# Altium footprint library Footprints.PcbLib: 67 footprints (part 1 of 5)
Each footprint in its own frame and in the unit in brackets; x right, y up, seen from the top. Pads: shape width x height; smd on the part's side, far side on the other; paste and mask are expansions set on the pad; w line width, h text height; cw(c..) or ccw(c..) is an arc to the next point about the centre after c.
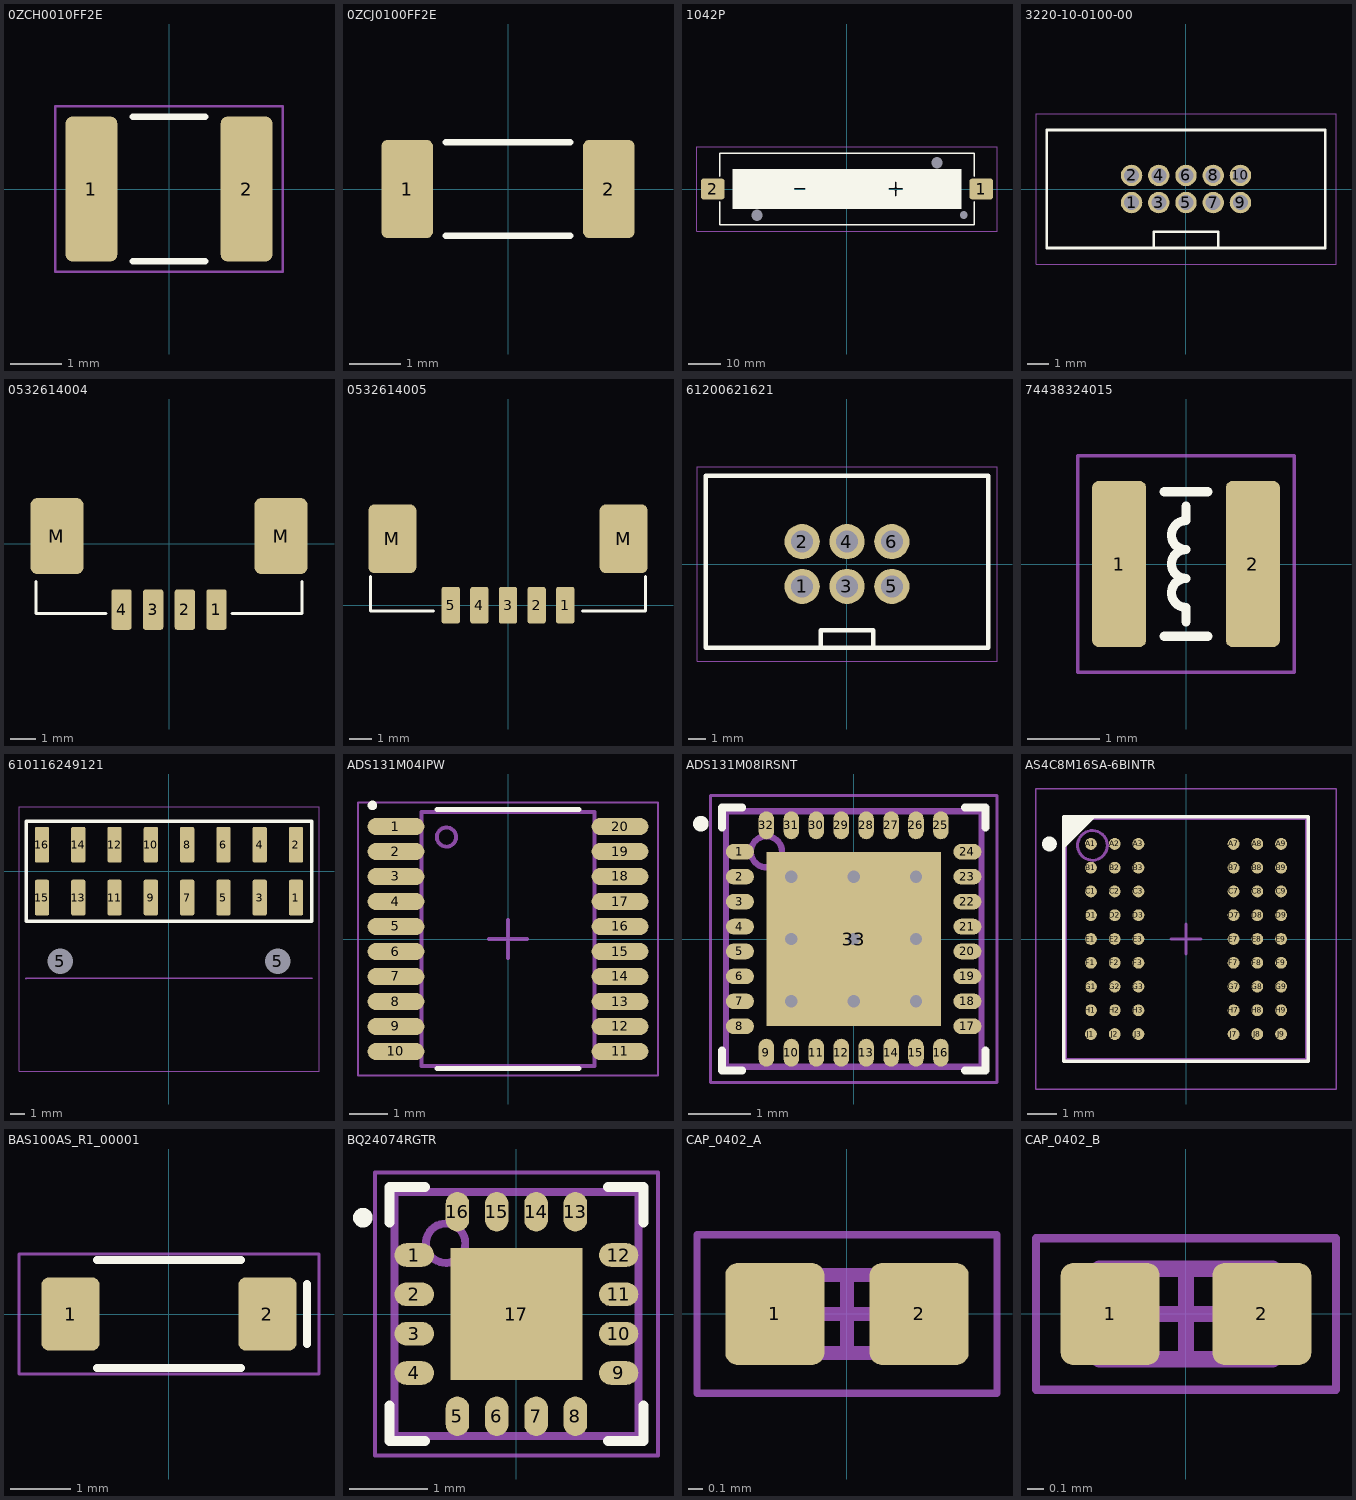
[diagram p0: the footprints below, top view; thin cyan lines are the x and y axes]

## 0ZCH0010FF2E [mm]
pads (2):
  rrect25% 1x2.8 smd: 1(-1.5,0) 2(1.5,0)
Top Overlay:
  lines w0.127: -0.7,-1.4 0.7,-1.4 ; -0.7,1.4 0.7,1.4
Top Courtyard:
  lines w0.05: -2.2,-1.6 2.2,-1.6 2.2,1.6 -2.2,1.6 -2.2,-1.6
Top Designator:
  text ".Designator" at -2.247,-0.225 h1
3D body "0ZCH0010FF2E.STEP": height 1.15, standoff 0, extent -1.607,-1.288 1.607,1.288

## 0ZCJ0100FF2E [mm]
pads (2):
  rrect25% 1x1.9 smd: 1(-1.95,0) 2(1.95,0)
Top Overlay:
  lines w0.127: -1.2,-0.9 1.2,-0.9 ; -1.2,0.9 1.2,0.9
Top Designator:
  text ".Designator" at -2.247,-0.225 h1
3D body "0ZCJ0100FF2E.step": height 0.82, standoff -0.03, extent -1.625,-0.825 1.625,0.825

## 1042P [mm] "Battery Holder (Open) 18650 1 Cell SMD (SMT) Tab"
height 18
pads (5):
  rrect25% 7.3x6.4 smd: 1(41.175,0) 2(-41.175,0)
  round 1.524 hole 3.5 unplated: 2(-27.6,-8) 2(27.6,8)
  round 1.524 hole 2.4 unplated: 2(35.82,-8)
Top Overlay:
  drawing of 47 lines, arcs and shapes, not listed
Top Courtyard:
  lines w0.05: -46,-13 46,-13 46,13 -46,13 -46,-13
Top Designator:
  text ".Designator" at -2.247,-0.225 h1
3D body "1042P.STEP": height 14.86, standoff -3.43, extent -43.002,-10.325 43.002,10.325

## 3220-10-0100-00 [mm] "Connector Header Through Hole 10 position 0.050\" (1.27mm)"
height 4.9
pads (10):
  round 1 hole 0.7: 1(-2.54,-0.635) 2(-2.54,0.635) 3(-1.27,-0.635) 4(-1.27,0.635) 5(0,-0.635) 6(0,0.635) 7(1.27,-0.635) 8(1.27,0.635) 9(2.54,-0.635) 10(2.54,0.635)
Top Overlay:
  lines w0.127: -6.5,-2.75 6.5,-2.75 6.5,2.75 -6.5,2.75 -6.5,-2.75 ; -1.5,-2.75 1.5,-2.75 1.5,-2 -1.5,-2 -1.5,-2.75
Top Courtyard:
  lines w0.05: -7,-3.5 7,-3.5 7,3.5 -7,3.5 -7,-3.5
Top Designator:
  text ".Designator" at -2.247,-0.225 h1
3D body "3220-10-0100-00.STEP": height 5.4, standoff -2.1, extent -6.325,-2.55 6.325,2.55

## 0532614004 [mm] "Connector Header Surface Mount, Right Angle 4 position 0.049\" (1.25mm)"
pads (6):
  rrect25% 0.8x1.6 smd: 1(1.875,-2.6) 2(0.625,-2.6) 3(-0.625,-2.6) 4(-1.875,-2.6)
  rrect25% 2.1x3 smd: M(-4.425,0.3) M(4.425,0.3)
Top Overlay:
  lines w0.127: -5.25,-1.5 -5.25,-2.75 -2.5,-2.75 ; 2.5,-2.75 5.25,-2.75 5.25,-1.5
Top Designator:
  text ".Designator" at -2.247,-0.225 h1
3D body "532614004.stp": height 3.2, standoff -0.2, extent -5.075,-2.6 5.075,2.6

## 0532614005 [mm] "Connector Header Surface Mount, Right Angle 5 position 0.049\" (1.25mm)"
pads (7):
  rrect25% 0.8x1.6 smd: 1(2.5,0) 2(1.25,0) 3(0,0) 4(-1.25,0) 5(-2.5,0)
  rrect25% 2.1x3 smd: M(-5.05,2.9) M(5.05,2.9)
Top Overlay:
  lines w0.127: -6,1.25 -6,-0.25 -3.25,-0.25 ; 3.25,-0.25 6,-0.25 6,1.25
Top Designator:
  text ".Designator" at -2.247,2.525 h1
3D body "532614005.stp": height 3.4, standoff 0, extent -5.7,0 5.7,5.2

## 61200621621 [mm]
pads (6):
  round 2 hole 1.25: 1(-2.54,-1.27) 2(-2.54,1.27) 3(0,-1.27) 4(0,1.27) 5(2.54,-1.27) 6(2.54,1.27)
Top Overlay:
  lines w0.254: -8,-4.75 8,-4.75 8,5 -8,5 -8,-4.75 ; -1.5,-4.75 1.5,-4.75 1.5,-3.75 -1.5,-3.75 -1.5,-4.75
Top Courtyard:
  lines w0.05: -8.5,-5.5 8.5,-5.5 8.5,5.5 -8.5,5.5 -8.5,-5.5
Top Designator:
  text ".Designator" at -2.247,-0.225 h1
3D body "Download_STP_61200621621_rev1.stp": height 8.93, standoff -3.17, extent -7.64,-4.425 7.64,4.748

## 74438324015 [mm]
pads (2):
  rrect25% 0.75x2.3 smd: 1(-0.925,0) 2(0.925,0)
Top Overlay:
  lines w0.127: -0.3,-1 0.3,-1 ; -0.3,1 0.3,1 ; 0,-0.8 0,-0.6 cw(c0,-0.4) 0,-0.2 cw(c0,0) 0,0.2 cw(c0,0.4) 0,0.6 0,0.8
Top Courtyard:
  lines w0.05: -1.5,-1.5 1.5,-1.5 1.5,1.5 -1.5,1.5 -1.5,-1.5
Top Designator:
  text ".Designator" at -2.247,-0.225 h1
3D body "Download_STP_WE-MAPI-2512_rev1.stp": height 1.2, standoff 0, extent -1.25,-1 1.25,1

## 610116249121 [mm] "Connector Header Surface Mount, Right Angle 16 position 0.100\" (2.54mm)"
height 5.08
pads (18):
  rrect25% 1x2.5 smd: 1(8.89,-1.85) 2(8.89,1.85) 3(6.35,-1.85) 4(6.35,1.85) 5(3.81,-1.85) 6(3.81,1.85) 7(1.27,-1.85) 8(1.27,1.85) 9(-1.27,-1.85) 10(-1.27,1.85) 11(-3.81,-1.85) 12(-3.81,1.85) 13(-6.35,-1.85) 14(-6.35,1.85) 15(-8.89,-1.85) 16(-8.89,1.85)
  round 1.524 hole 1.8 unplated: 5(-7.62,-6.3) 5(7.62,-6.3)
Top Overlay:
  lines w0.254: -10,-3.5 10,-3.5 10,3.5 -10,3.5 -10,-3.5
Top Courtyard:
  lines w0.05: -10.5,-14 10.5,-14 10.5,4.5 -10.5,4.5 -10.5,-14
Top Assembly:
  lines w0.127: -10,-7.52 10,-7.5
Top Designator:
  text ".Designator" at -2.247,-0.225 h1
3D body "Download_STP_610116249121_rev1.stp": height 5.09, standoff -1.39, extent -10.16,-13.52 10.16,2.64

## ADS131M04IPW [mm] "TSOP, 20-Leads, Body 6.50x4.40mm, Pitch 0.65mm, IPC Medium Density"
height 1.2
pads (20):
  oval 1.475x0.45 smd: 1(-2.913,2.925) 2(-2.913,2.275) 3(-2.913,1.625) 4(-2.913,0.975) 5(-2.913,0.325) 6(-2.913,-0.325) 7(-2.913,-0.975) 8(-2.913,-1.625) 9(-2.913,-2.275) 10(-2.913,-2.925) 11(2.912,-2.925) 12(2.912,-2.275) 13(2.912,-1.625) 14(2.912,-0.975) 15(2.912,-0.325) 16(2.912,0.325) 17(2.912,0.975) 18(2.912,1.625) 19(2.912,2.275) 20(2.912,2.925)
Top Overlay:
  circle w0.125: c-3.525,3.475 r0.062
  lines w0.127: -1.848,-3.363 1.848,-3.363 ; -1.848,3.364 1.848,3.364
Top Courtyard:
  lines w0.05: -3.9,-3.55 3.9,-3.55 3.9,3.55 -3.9,3.55 -3.9,-3.55
Top Assembly:
  circle w0.1: c-1.6,2.65 r0.25
  lines w0.1: -2.25,-3.3 2.25,-3.3 2.25,3.3 -2.25,3.3 -2.25,-3.3
Top Designator:
  text ".Designator" at -2.247,-0.225 h1
Top Component Center:
  lines w0.1: -0.5,0 0.5,0 ; 0,-0.5 0,0.5
3D body "ADS131M04IPW.step": height 1.2, standoff 0, extent -3.2,-3.25 3.2,3.25

## ADS131M08IRSNT [mm] "PQFN, 32-Leads, Body 4.00x4.00mm, Pitch 0.40mm, Thermal Pad 2.80x2.80mm, IPC Medium Density"
height 0.8
pads (33):
  oval 0.45x0.25 smd: 1(-1.825,1.4) 2(-1.825,1) 3(-1.825,0.6) 4(-1.825,0.2) 5(-1.825,-0.2) 6(-1.825,-0.6) 7(-1.825,-1) 8(-1.825,-1.4) 17(1.825,-1.4) 18(1.825,-1) 19(1.825,-0.6) 20(1.825,-0.2) 21(1.825,0.2) 22(1.825,0.6) 23(1.825,1) 24(1.825,1.4)
  oval 0.25x0.45 smd: 9(-1.4,-1.825) 10(-1,-1.825) 11(-0.6,-1.825) 12(-0.2,-1.825) 13(0.2,-1.825) 14(0.6,-1.825) 15(1,-1.825) 16(1.4,-1.825) 25(1.4,1.825) 26(1,1.825) 27(0.6,1.825) 28(0.2,1.825) 29(-0.2,1.825) 30(-0.6,1.825) 31(-1,1.825) 32(-1.4,1.825)
  rect 2.8x2.8 smd paste-1.4: 33(0,0)
via 1,-1 diameter 0.5 hole 0.2
via 0,-1 diameter 0.5 hole 0.2
via -1,-1 diameter 0.5 hole 0.2
via 1,0 diameter 0.5 hole 0.2
via 0,0 diameter 0.5 hole 0.2
via -1,0 diameter 0.5 hole 0.2
via 1,1 diameter 0.5 hole 0.2
via 0,1 diameter 0.5 hole 0.2
via -1,1 diameter 0.5 hole 0.2
Top Overlay:
  circle w0.125: c-2.452,1.85 r0.062
  lines w0.127: -2.114,-1.789 -2.114,-2.114 -1.789,-2.114 ; -2.114,1.789 -2.114,2.114 -1.789,2.114 ; 1.789,-2.114 2.114,-2.114 2.114,-1.789 ; 1.789,2.114 2.114,2.114 2.114,1.789
Top Paste:
  rectangle: 0.172,-1.057 1.057,-0.172
  rectangle: 0.172,0.172 1.057,1.057
  rectangle: -1.057,-1.057 -0.172,-0.172
  rectangle: -1.057,0.172 -0.172,1.057
Top Courtyard:
  lines w0.05: -2.3,-2.3 2.3,-2.3 2.3,2.3 -2.3,2.3 -2.3,-2.3
Top Assembly:
  circle w0.1: c-1.4,1.4 r0.25
  lines w0.1: -2.05,-2.05 2.05,-2.05 2.05,2.05 -2.05,2.05 -2.05,-2.05
Top Designator:
  text ".Designator" at -2.247,-0.225 h1
Top Component Center:
  lines w0.1: -0.5,0 0.5,0 ; 0,-0.5 0,0.5
3D body "ADS131M08IRSNT.step": height 0.8, standoff 0, extent -2,-2 2,2

## AS4C8M16SA-6BINTR [mm] "BGA, 54-Leads, Body 8.00x8.00mmx1.20mm, Pitch 0.80mm"
height 1.2
pads (54):
  round 0.4 smd: A1(-3.2,3.2) A2(-2.4,3.2) A3(-1.6,3.2) A7(1.6,3.2) A8(2.4,3.2) A9(3.2,3.2) B1(-3.2,2.4) B2(-2.4,2.4) B3(-1.6,2.4) B7(1.6,2.4) B8(2.4,2.4) B9(3.2,2.4) C1(-3.2,1.6) C2(-2.4,1.6) C3(-1.6,1.6) C7(1.6,1.6) C8(2.4,1.6) C9(3.2,1.6) D1(-3.2,0.8) D2(-2.4,0.8) D3(-1.6,0.8) D7(1.6,0.8) D8(2.4,0.8) D9(3.2,0.8) E1(-3.2,0) E2(-2.4,0) E3(-1.6,0) E7(1.6,0) E8(2.4,0) E9(3.2,0) F1(-3.2,-0.8) F2(-2.4,-0.8) F3(-1.6,-0.8) F7(1.6,-0.8) F8(2.4,-0.8) F9(3.2,-0.8) G1(-3.2,-1.6) G2(-2.4,-1.6) G3(-1.6,-1.6) G7(1.6,-1.6) G8(2.4,-1.6) G9(3.2,-1.6) H1(-3.2,-2.4) H2(-2.4,-2.4) H3(-1.6,-2.4) H7(1.6,-2.4) H8(2.4,-2.4) H9(3.2,-2.4) J1(-3.2,-3.2) J2(-2.4,-3.2) J3(-1.6,-3.2) J7(1.6,-3.2) J8(2.4,-3.2) J9(3.2,-3.2)
Top Overlay:
  circle w0.25: c-4.6,3.2 r0.125
  region: -3.114,4.114 -4.114,3.114 -4.114,4.114
  lines w0.127: -4.114,3.114 -3.114,4.114 ; -4.114,-4.113 -4.114,4.114 4.113,4.114 4.113,-4.113 -4.114,-4.113
Top Courtyard:
  lines w0.05: -5.05,-5.05 -5.05,5.05 5.05,5.05 5.05,-5.05 -5.05,-5.05
Top Assembly:
  circle w0.1: c-3.15,3.15 r0.5
  lines w0.1: -4.05,-4.05 -4.05,4.05 4.05,4.05 4.05,-4.05 -4.05,-4.05
Top Designator:
  text ".Designator" at -2.247,-0.225 h1
Top Component Center:
  lines w0.1: -0.5,0 0.5,0 ; 0,-0.5 0,0.5
3D body "AS4C8M16SA-6BINTR.step": height 1.2, standoff 0, extent -4,-4 4,4

## BAS100AS_R1_00001 [mm] "Diode 100 V 500mA Surface Mount SOD-123"
height 1.35
pads (2):
  rrect25% 0.97x1.22 smd: 1(-1.64,0) 2(1.64,0)
Top Overlay:
  lines w0.127: -1.2,-0.9 1.2,-0.9 ; -1.2,0.9 1.2,0.9 ; 2.3,-0.5 2.3,0.5
Top Courtyard:
  lines w0.05: -2.5,-1 2.5,-1 2.5,1 -2.5,1 -2.5,-1
Top Designator:
  text ".Designator" at -2.247,-0.225 h1
3D body "SOD123_MCC.step": height 1.35, standoff 0, extent -1.93,-0.826 1.93,0.826

## BQ24074RGTR [mm] "PQFN, 16-Leads, Body 3.00x3.00mm, Pitch 0.50mm, Thermal Pad 1.68x1.68mm, IPC Medium Density"
height 1
pads (17):
  oval 0.5x0.3 smd: 1(-1.3,0.75) 2(-1.3,0.25) 3(-1.3,-0.25) 4(-1.3,-0.75) 9(1.3,-0.75) 10(1.3,-0.25) 11(1.3,0.25) 12(1.3,0.75)
  oval 0.3x0.5 smd: 5(-0.75,-1.3) 6(-0.25,-1.3) 7(0.25,-1.3) 8(0.75,-1.3) 13(0.75,1.3) 14(0.25,1.3) 15(-0.25,1.3) 16(-0.75,1.3)
  rect 1.68x1.68 smd paste-0.309: 17(0,0)
Top Overlay:
  circle w0.125: c-1.952,1.225 r0.062
  lines w0.127: -1.613,-1.164 -1.613,-1.613 -1.164,-1.613 ; -1.613,1.164 -1.613,1.613 -1.164,1.613 ; 1.164,-1.613 1.613,-1.613 1.613,-1.164 ; 1.164,1.613 1.613,1.613 1.613,1.164
Top Courtyard:
  lines w0.05: -1.8,-1.8 1.8,-1.8 1.8,1.8 -1.8,1.8 -1.8,-1.8
Top Assembly:
  circle w0.1: c-0.9,0.9 r0.25
  lines w0.1: -1.55,-1.55 1.55,-1.55 1.55,1.55 -1.55,1.55 -1.55,-1.55
Top Designator:
  text ".Designator" at -2.247,-0.225 h1
Top Component Center:
  lines w0.1: -0.5,0 0.5,0 ; 0,-0.5 0,0.5
3D body "BQ24074RGTR.step": height 1, standoff 0, extent -1.5,-1.5 1.5,1.5

## CAP_0402_A [mm] "Chip Capacitor, 2-Leads, Body 1.00x0.50mm, IPC Low Density"
height 0.5
pads (2):
  rrect25% 0.7x0.72 smd: 1(-0.51,0) 2(0.51,0)
Top Courtyard:
  lines w0.05: -1.06,-0.56 -1.06,0.56 1.06,0.56 1.06,-0.56 -1.06,-0.56
Top Assembly:
  lines w0.1: -0.525,-0.275 -0.525,0.275 0.525,0.275 0.525,-0.275 -0.525,-0.275
Top Designator:
  text ".Designator" at -2.247,-0.225 h1
Top Component Center:
  lines w0.1: -0.275,0 0.275,0 ; 0,-0.275 0,0.275
3D body "CAP_0402_A.step": height 0.5, standoff 0, extent -0.5,-0.25 0.5,0.25

## CAP_0402_B [mm] "Chip Capacitor, 2-Leads, Body 1.00x0.50mm, IPC Medium Density"
height 0.5
pads (2):
  rrect25% 0.6x0.62 smd: 1(-0.46,0) 2(0.46,0)
Top Courtyard:
  lines w0.05: -0.91,-0.46 0.91,-0.46 0.91,0.46 -0.91,0.46 -0.91,-0.46
Top Assembly:
  lines w0.1: -0.525,-0.275 0.525,-0.275 0.525,0.275 -0.525,0.275 -0.525,-0.275
Top Designator:
  text ".Designator" at -2.247,-0.225 h1
Top Component Center:
  lines w0.1: -0.275,0 0.275,0 ; 0,-0.275 0,0.275
3D body "CAP_0402_B.step": height 0.5, standoff 0, extent -0.5,-0.25 0.5,0.25